# Altium footprint library FootPrintLib_9.PcbLib: 287 footprints (part 14 of 18)
Each footprint in its own frame and in the unit in brackets; x right, y up, seen from the top. Pads: shape width x height; smd on the part's side, far side on the other; paste and mask are expansions set on the pad; w line width, h text height; cw(c..) or ccw(c..) is an arc to the next point about the centre after c.
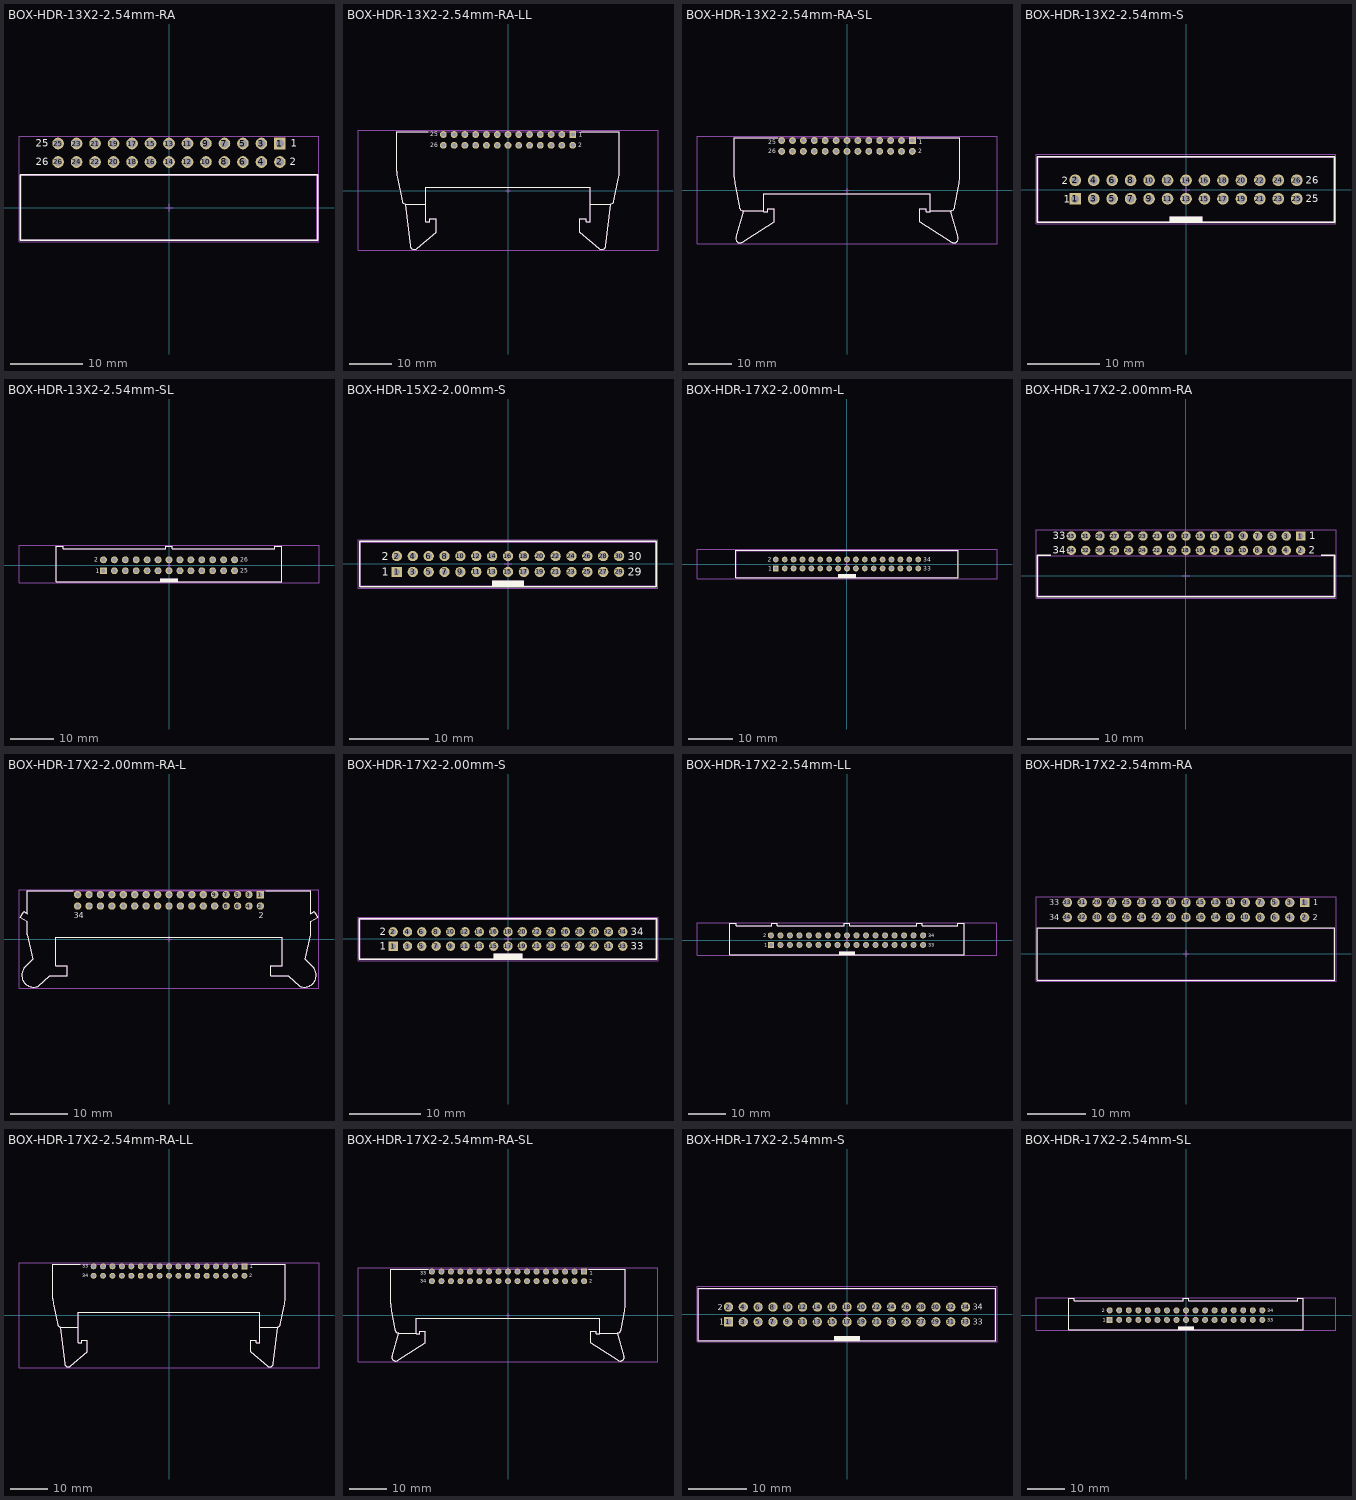
[diagram p13: the footprints below, top view; thin cyan lines are the x and y axes]

## BOX-HDR-13X2-2.54mm-RA [mm] "26 pins, right angled, gold plating"
height 9.1
pads (26):
  rect 1.6x1.6 hole 1.1: 1(15.24,8.805)
  round 1.6 hole 1.1: 2(15.24,6.265) 3(12.7,8.805) 4(12.7,6.265) 5(10.16,8.805) 6(10.16,6.265) 7(7.62,8.805) 8(7.62,6.265) 9(5.08,8.805) 10(5.08,6.265) 11(2.54,8.805) 12(2.54,6.265) 13(0,8.805) 14(0,6.265) 15(-2.54,8.805) 16(-2.54,6.265) 17(-5.08,8.805) 18(-5.08,6.265) 19(-7.62,8.805) 20(-7.62,6.265) 21(-10.16,8.805) 22(-10.16,6.265) 23(-12.7,8.805) 24(-12.7,6.265) 25(-15.24,8.805) 26(-15.24,6.265)
Top Overlay:
  lines w0.2: -20.415,-4.5 20.415,-4.5 20.415,4.5 -20.415,4.5 -20.415,-4.5
  text "25" at -18.31,8.34 h1.02
  text "26" at -18.31,5.8 h1.02
  text "1" at 16.7,8.34 h1.02
  text "2" at 16.6,5.8 h1.02
Mechanical 13:
  lines w0.1: -20.34,-4.425 20.34,-4.425 20.34,4.425 -20.34,4.425 -20.34,-4.425
Mechanical 15:
  lines w0.05: -0.5,0 0.5,0 ; 0,-0.5 0,0.5 ; -20.615,-4.7 -20.615,9.805 20.615,9.805 20.615,-4.7 -20.615,-4.7
3D body "61202621721.stp": height 9.23, standoff -2.88, extent -20.34,-4.425 20.34,9.125

## BOX-HDR-13X2-2.54mm-RA-LL [mm] "26 pins, right angeled, long lever, gold plating"
height 10.8
pads (26):
  rect 1.6x1.6 hole 1.02: 1(15.24,13.23)
  round 1.6 hole 1.02: 2(15.24,10.69) 3(12.7,13.23) 4(12.7,10.69) 5(10.16,13.23) 6(10.16,10.69) 7(7.62,13.23) 8(7.62,10.69) 9(5.08,13.23) 10(5.08,10.69) 11(2.54,13.23) 12(2.54,10.69) 13(0,13.23) 14(0,10.69) 15(-2.54,13.23) 16(-2.54,10.69) 17(-5.08,13.23) 18(-5.08,10.69) 19(-7.62,13.23) 20(-7.62,10.69) 21(-10.16,13.23) 22(-10.16,10.69) 23(-12.7,13.23) 24(-12.7,10.69) 25(-15.24,13.23) 26(-15.24,10.69)
Top Overlay:
  lines w0.2: -26.26,4.54 -26.26,13.85 -18.81,13.85 ; -26.255,4.54 ccw(c-16.26,4.84) -26.014,2.636 -24.969,-2.534 ; -24.963,-2.533 ccw(c-24.04,-2.15) -24.04,-3.15 -19.36,-3.15 ; -24.224,-3.15 -23.078,-13.022 ccw(c-22.09,-12.87) -21.432,-13.623 -16.961,-9.758 ; -16.96,-9.76 -16.96,-6.66 -18.46,-6.66 -18.46,-7.37 -19.36,-7.37 -19.36,0.85 19.36,0.85 19.36,-7.37 18.46,-7.37 18.46,-6.66 16.96,-6.66 16.96,-9.76 ; 16.961,-9.758 21.433,-13.623 ccw(c22.09,-12.87) 23.078,-13.022 24.224,-3.15 ; 17.21,13.85 26.26,13.85 26.26,4.54 ; 19.36,-3.15 24.04,-3.15 ccw(c24.04,-2.15) 24.964,-2.533 ; 24.969,-2.534 26.014,2.636 ccw(c16.26,4.84) 26.256,4.54
  text "2" at 16.56,10.26 h1.02
  text "1" at 16.66,12.66 h1.02
  text "26" at -18.31,10.26 h1.02
  text "25" at -18.31,12.8 h1.02
Mechanical 13:
  lines w0.1: -26.26,4.54 -26.26,13.85 26.26,13.85 26.26,4.54 ; -26.255,4.54 ccw(c-16.26,4.84) -26.014,2.636 -24.969,-2.534 ; -24.963,-2.533 ccw(c-24.04,-2.15) -24.04,-3.15 -19.36,-3.15 ; -24.224,-3.15 -23.078,-13.022 ccw(c-22.09,-12.87) -21.432,-13.623 -16.961,-9.758 ; -16.96,-9.76 -16.96,-6.66 -18.46,-6.66 -18.46,-7.37 -19.36,-7.37 -19.36,0.85 19.36,0.85 19.36,-7.37 18.46,-7.37 18.46,-6.66 16.96,-6.66 16.96,-9.76 ; 16.961,-9.758 21.433,-13.623 ccw(c22.09,-12.87) 23.078,-13.022 24.224,-3.15 ; 19.36,-3.15 24.04,-3.15 ccw(c24.04,-2.15) 24.964,-2.533 ; 24.969,-2.534 26.014,2.636 ccw(c16.26,4.84) 26.256,4.54
Mechanical 15:
  lines w0.05: -0.5,0 0.5,0 ; 0,-0.5 0,0.5 ; -35.36,-14.06 35.36,-14.06 35.36,14.23 -35.36,14.23 -35.36,-14.06
3D body "61202622921 (rev1).stp": height 8.35, standoff -2.35, extent -26.26,-13.871 26.26,13.85

## BOX-HDR-13X2-2.54mm-RA-SL [mm] "26 pins, right angeled, short lever, gold plating"
height 8.3
pads (26):
  rect 1.6x1.6 hole 1.02: 1(15.24,11.63)
  round 1.6 hole 1.02: 2(15.24,9.09) 3(12.7,11.63) 4(12.7,9.09) 5(10.16,11.63) 6(10.16,9.09) 7(7.62,11.63) 8(7.62,9.09) 9(5.08,11.63) 10(5.08,9.09) 11(2.54,11.63) 12(2.54,9.09) 13(0,11.63) 14(0,9.09) 15(-2.54,11.63) 16(-2.54,9.09) 17(-5.08,11.63) 18(-5.08,9.09) 19(-7.62,11.63) 20(-7.62,9.09) 21(-10.16,11.63) 22(-10.16,9.09) 23(-12.7,11.63) 24(-12.7,9.09) 25(-15.24,11.63) 26(-15.24,9.09)
Top Overlay:
  lines w0.2: -25.124,-3.751 -26.066,1.138 cw(c-16.26,3.1) -26.26,3.1 -26.26,12.25 -16.16,12.25 ; -25.12,-3.75 ccw(c-24.12,-3.75) -24.12,-4.75 ; -24.215,-4.75 -19.46,-4.75 ; -24.034,-4.851 -25.867,-10.941 ccw(c-24.91,-11.23) -24.36,-12.066 -16.96,-7.33 -16.96,-4.23 -18.46,-4.23 -18.46,-4.94 -19.46,-4.94 -19.46,-0.75 19.46,-0.75 19.46,-4.94 18.46,-4.94 18.46,-4.23 16.96,-4.23 16.96,-7.33 24.36,-12.067 ccw(c24.91,-11.23) 25.867,-10.941 24.034,-4.851 ; 16.41,12.25 26.26,12.25 26.26,3.1 cw(c16.26,3.1) 26.066,1.138 25.124,-3.751 ; 19.46,-4.75 24.215,-4.75 ; 24.12,-4.75 ccw(c24.12,-3.75) 25.12,-3.75
  text "2" at 16.66,8.6 h1.02
  text "1" at 16.76,10.8 h1.02
  text "25" at -18.31,10.8 h1.02
  text "26" at -18.31,8.6 h1.02
Mechanical 13:
  lines w0.1: -25.124,-3.751 -26.066,1.138 cw(c-16.26,3.1) -26.26,3.1 -26.26,12.25 26.26,12.25 26.26,3.1 cw(c16.26,3.1) 26.066,1.138 25.124,-3.751 ; -25.12,-3.75 ccw(c-24.12,-3.75) -24.12,-4.75 ; -24.215,-4.75 -19.46,-4.75 ; -24.034,-4.851 -25.867,-10.941 ccw(c-24.91,-11.23) -24.36,-12.066 -16.96,-7.33 -16.96,-4.23 -18.46,-4.23 -18.46,-4.94 -19.46,-4.94 -19.46,-0.75 19.46,-0.75 19.46,-4.94 18.46,-4.94 18.46,-4.23 16.96,-4.23 16.96,-7.33 24.36,-12.067 ccw(c24.91,-11.23) 25.867,-10.941 24.034,-4.851 ; 19.46,-4.75 24.215,-4.75 ; 24.12,-4.75 ccw(c24.12,-3.75) 25.12,-3.75
Mechanical 15:
  lines w0.05: -0.5,0 0.5,0 ; 0,-0.5 0,0.5 ; -34.96,-12.45 34.96,-12.45 34.96,12.63 -34.96,12.63 -34.96,-12.45
3D body "61202622121.stp": height 8.35, standoff -3.35, extent -26.26,-12.25 26.26,12.25

## BOX-HDR-13X2-2.54mm-S [mm] "26 pins, straight, gold plating"
height 9.1
pads (26):
  rect 1.6x1.6 hole 1.1: 1(-15.24,-1.27)
  round 1.6 hole 1.1: 2(-15.24,1.27) 3(-12.7,-1.27) 4(-12.7,1.27) 5(-10.16,-1.27) 6(-10.16,1.27) 7(-7.62,-1.27) 8(-7.62,1.27) 9(-5.08,-1.27) 10(-5.08,1.27) 11(-2.54,-1.27) 12(-2.54,1.27) 13(0,-1.27) 14(0,1.27) 15(2.54,-1.27) 16(2.54,1.27) 17(5.08,-1.27) 18(5.08,1.27) 19(7.62,-1.27) 20(7.62,1.27) 21(10.16,-1.27) 22(10.16,1.27) 23(12.7,-1.27) 24(12.7,1.27) 25(15.24,-1.27) 26(15.24,1.27)
Top Overlay:
  rectangle: -2.25,-4.5 2.25,-3.7
  lines w0.2: -20.44,-4.5 -20.44,4.5 20.44,4.5 20.44,-4.5 -20.44,-4.5
  text "26" at 16.5,0.8 h1.02
  text "25" at 16.5,-1.74 h1.02
  text "2" at -17.1,0.74 h1.02
  text "1" at -16.8,-1.8 h1.02
Mechanical 13:
  rectangle: -2.25,-4.425 2.25,-3.7
  lines w0.1: -20.34,-4.425 20.34,-4.425 20.34,4.425 -20.34,4.425 -20.34,-4.425
Mechanical 15:
  lines w0.05: -0.5,0 0.5,0 ; 0,-0.5 0,0.5 ; -20.64,-4.7 -20.64,4.85 20.64,4.85 20.64,-4.7 -20.64,-4.7
3D body "61202621621.stp": height 9.13, standoff -2.98, extent -20.34,-4.425 20.34,4.75

## BOX-HDR-13X2-2.54mm-SL [mm] "26 pins, straight, short lever, gold plating"
height 24.5
pads (26):
  rect 1.6x1.6 hole 1.02: 1(-15.24,-1.27)
  round 1.6 hole 1.02: 2(-15.24,1.27) 3(-12.7,-1.27) 4(-12.7,1.27) 5(-10.16,-1.27) 6(-10.16,1.27) 7(-7.62,-1.27) 8(-7.62,1.27) 9(-5.08,-1.27) 10(-5.08,1.27) 11(-2.54,-1.27) 12(-2.54,1.27) 13(0,-1.27) 14(0,1.27) 15(2.54,-1.27) 16(2.54,1.27) 17(5.08,-1.27) 18(5.08,1.27) 19(7.62,-1.27) 20(7.62,1.27) 21(10.16,-1.27) 22(10.16,1.27) 23(12.7,-1.27) 24(12.7,1.27) 25(15.24,-1.27) 26(15.24,1.27)
Top Overlay:
  rectangle: -2.1,-3.85 2.1,-3.05
  lines w0.2: -0.7,4.45 0.7,4.45 0.7,3.85 24.61,3.85 24.61,4.45 26.16,4.45 26.16,-3.85 -26.16,-3.85 -26.16,4.45 -24.61,4.45 -24.61,3.85 -0.7,3.85 -0.7,4.45 ; -0.7,4.45 -0.7,4.45
  text "2" at -17.36,0.8 h1.02
  text "1" at -17.06,-1.8 h1.02
  text "25" at 16.56,-1.74 h1.02
  text "26" at 16.56,0.8 h1.02
Mechanical 13:
  rectangle: -2.1,-3.85 2.1,-3.05
  lines w0.1: -0.7,4.45 -0.7,3.85 -24.61,3.85 -24.61,4.45 -26.16,4.45 -26.16,-3.85 26.16,-3.85 26.16,4.45 24.61,4.45 24.61,3.85 0.7,3.85 0.7,4.45 -0.7,4.45 ; -0.7,4.45 -0.7,4.45
Mechanical 15:
  lines w0.05: -0.5,0 0.5,0 ; 0,-0.5 0,0.5 ; -34.86,-4.05 -34.86,4.65 34.86,4.65 34.86,-4.05 -34.86,-4.05
3D body "61202622021.stp": height 24.55, standoff -3.35, extent -26.259,-3.849 26.261,4.451

## BOX-HDR-15X2-2.00mm-S [mm] "2.00mm Male Box Header, 30p"
height 5.6
pads (30):
  rect 1.3x1.3 hole 0.8: 1(-14,-1)
  round 1.3 hole 0.8: 2(-14,1) 3(-12,-1) 4(-12,1) 5(-10,-1) 6(-10,1) 7(-8,-1) 8(-8,1) 9(-6,-1) 10(-6,1) 11(-4,-1) 12(-4,1) 13(-2,-1) 14(-2,1) 15(0,-1) 16(0,1) 17(2,-1) 18(2,1) 19(4,-1) 20(4,1) 21(6,-1) 22(6,1) 23(8,-1) 24(8,1) 25(10,-1) 26(10,1) 27(12,-1) 28(12,1) 29(14,-1) 30(14,1)
Top Overlay:
  rectangle: -2,-2.85 2,-2.05
  lines w0.2: -18.7,-2.85 18.7,-2.85 18.7,2.85 -18.7,2.85 -18.7,-2.85
  text "1" at -15.9,-1.5 h1.02
  text "2" at -15.9,0.5 h1.02
  text "30" at 15.1,0.5 h1.02
  text "29" at 15.1,-1.5 h1.02
Mechanical 13:
  rectangle: -2,-2.75 2,-2.05
  lines w0.1: -18.6,-2.75 -18.6,2.75 18.6,2.75 18.6,-2.75 -18.6,-2.75
Mechanical 15:
  lines w0.05: -0.5,0 0.5,0 ; 0,-0.5 0,0.5 ; -18.9,-3.05 -18.9,3.05 18.9,3.05 18.9,-3.05 -18.9,-3.05
3D body "62503021621.stp": height 5.65, standoff -2.5, extent -18.6,-2.75 18.6,2.75

## BOX-HDR-17X2-2.00mm-L [mm] "2.00mm Male Box Header with Lever, 34p"
height 16.85
pads (34):
  rect 1.3x1.3 hole 0.8: 1(-16,-1)
  round 1.3 hole 0.8: 2(-16,1) 3(-14,-1) 4(-14,1) 5(-12,-1) 6(-12,1) 7(-10,-1) 8(-10,1) 9(-8,-1) 10(-8,1) 11(-6,-1) 12(-6,1) 13(-4,-1) 14(-4,1) 15(-2,-1) 16(-2,1) 17(0,-1) 18(0,1) 19(2,-1) 20(2,1) 21(4,-1) 22(4,1) 23(6,-1) 24(6,1) 25(8,-1) 26(8,1) 27(10,-1) 28(10,1) 29(12,-1) 30(12,1) 31(14,-1) 32(14,1) 33(16,-1) 34(16,1)
Top Overlay:
  rectangle: -2,-3.1 2,-2.3
  lines w0.2: -25,-3.1 25,-3.1 25,3.1 -25,3.1 -25,-3.1
  text "34" at 17.1,0.5 h1.02
  text "33" at 17.1,-1.5 h1.02
  text "2" at -17.8,0.5 h1.02
  text "1" at -17.7,-1.5 h1.02
Mechanical 13:
  rectangle: -2,-3 2,-2.3
  lines w0.1: -24.85,-3 24.85,-3 24.85,3 -24.85,3 -24.85,-3
Mechanical 15:
  lines w0.05: -0.5,0 0.5,0 ; 0,-0.5 0,0.5 ; -33.7,-3.3 -33.7,3.3 33.7,3.3 33.7,-3.3 -33.7,-3.3
3D body "62503422021.stp": height 16.9, standoff -2.95, extent -26.062,-3 26.063,3

## BOX-HDR-17X2-2.00mm-RA [mm] "2.00mm Male Angled Box Header, 34p"
height 5.4
pads (34):
  rect 1.3x1.3 hole 0.8: 1(16,5.55)
  round 1.3 hole 0.8: 2(16,3.55) 3(14,5.55) 4(14,3.55) 5(12,5.55) 6(12,3.55) 7(10,5.55) 8(10,3.55) 9(8,5.55) 10(8,3.55) 11(6,5.55) 12(6,3.55) 13(4,5.55) 14(4,3.55) 15(2,5.55) 16(2,3.55) 17(0,5.55) 18(0,3.55) 19(-2,5.55) 20(-2,3.55) 21(-4,5.55) 22(-4,3.55) 23(-6,5.55) 24(-6,3.55) 25(-8,5.55) 26(-8,3.55) 27(-10,5.55) 28(-10,3.55) 29(-12,5.55) 30(-12,3.55) 31(-14,5.55) 32(-14,3.55) 33(-16,5.55) 34(-16,3.55)
Top Overlay:
  lines w0.2: -18.875,2.9 -20.725,2.9 -20.725,-2.9 20.725,-2.9 20.725,2.9 18.875,2.9
  text "2" at 17.1,3.075 h1.02
  text "1" at 17.2,5.075 h1.02
  text "33" at -18.6,5.075 h1.02
  text "34" at -18.6,3.075 h1.02
Mechanical 13:
  lines w0.1: -20.6,-2.8 20.6,-2.8 20.6,2.8 -20.6,2.8 -20.6,-2.8
Mechanical 15:
  lines w0.05: -0.5,0 0.5,0 ; 0,-0.5 0,0.5 ; -20.925,-3.1 20.925,-3.1 20.925,6.4 -20.925,6.4 -20.925,-3.1
3D body "62503421721 (rev1).stp": height 5.5, standoff -2.85, extent -20.6,-2.8 20.6,5.8

## BOX-HDR-17X2-2.00mm-RA-L [mm] "2.00mm Male Angled Box Header with Lever, 34p"
height 3.15
pads (34):
  rect 1.3x1.3 hole 0.8: 1(16,7.775)
  round 1.3 hole 0.8: 2(16,5.775) 3(14,7.775) 4(14,5.775) 5(12,7.775) 6(12,5.775) 7(10,7.775) 8(10,5.775) 9(8,7.775) 10(8,5.775) 11(6,7.775) 12(6,5.775) 13(4,7.775) 14(4,5.775) 15(2,7.775) 16(2,5.775) 17(0,7.775) 18(0,5.775) 19(-2,7.775) 20(-2,5.775) 21(-4,7.775) 22(-4,5.775) 23(-6,7.775) 24(-6,5.775) 25(-8,7.775) 26(-8,5.775) 27(-10,7.775) 28(-10,5.775) 29(-12,7.775) 30(-12,5.775) 31(-14,7.775) 32(-14,5.775) 33(-16,7.775) 34(-16,5.775)
Top Overlay:
  lines w0.2: -25.466,4.813 -26.06,3.785 -24.851,3.087 -24.851,0.753 ; -25.46,4.815 -24.848,4.462 ; -24.894,-4.611 ccw(c-23.68,-6.325) -22.865,-8.26 ; -24.892,-4.613 -23.85,-3.535 -24.837,0.738 ; -24.85,4.464 -24.85,8.425 -16.75,8.425 ; -22.866,-8.259 -20.85,-6.475 -17.85,-6.475 -17.85,-4.675 -19.85,-4.675 -19.85,0.325 19.85,0.325 19.85,-4.675 17.85,-4.675 17.85,-6.475 20.85,-6.475 22.866,-8.259 ; 16.95,8.425 24.85,8.425 24.85,4.464 ; 22.865,-8.26 ccw(c23.68,-6.325) 24.894,-4.611 ; 24.837,0.738 23.85,-3.535 24.892,-4.613 ; 24.848,4.462 25.46,4.815 ; 24.851,0.753 24.851,3.087 26.06,3.785 25.466,4.813
  text "34" at -16.7,3.675 h1.02
  text "2" at 15.7,3.675 h1.02
Mechanical 13:
  lines w0.1: -25.466,4.813 -26.06,3.785 -24.851,3.087 -24.851,0.753 ; -25.46,4.815 -24.848,4.462 ; -24.894,-4.611 ccw(c-23.68,-6.325) -22.865,-8.26 ; -24.892,-4.613 -23.85,-3.535 -24.837,0.738 ; -24.85,4.464 -24.85,8.425 24.85,8.425 ; -22.866,-8.259 -20.85,-6.475 -17.85,-6.475 -17.85,-4.675 -19.85,-4.675 -19.85,0.325 19.85,0.325 19.85,-4.675 17.85,-4.675 17.85,-6.475 20.85,-6.475 22.866,-8.259 ; 22.865,-8.26 ccw(c23.68,-6.325) 24.894,-4.611 ; 24.837,0.738 23.85,-3.535 24.892,-4.613 ; 24.848,4.462 25.46,4.815 ; 24.848,8.423 24.85,8.425 ; 24.85,4.464 24.85,8.425 ; 24.851,0.753 24.851,3.087 26.06,3.785 25.466,4.813
Mechanical 15:
  lines w0.05: -0.5,0 0.5,0 ; 0,-0.5 0,0.5 ; -26.262,-8.625 -26.262,8.625 26.262,8.625 26.262,-8.625 -26.262,-8.625
3D body "62503422121.stp": height 6.1, standoff -3.05, extent -26.062,-8.425 26.062,8.425

## BOX-HDR-17X2-2.00mm-S [mm] "2.00mm Male Box Header, 34p"
height 5.6
pads (34):
  rect 1.3x1.3 hole 0.8: 1(-16,-1)
  round 1.3 hole 0.8: 2(-16,1) 3(-14,-1) 4(-14,1) 5(-12,-1) 6(-12,1) 7(-10,-1) 8(-10,1) 9(-8,-1) 10(-8,1) 11(-6,-1) 12(-6,1) 13(-4,-1) 14(-4,1) 15(-2,-1) 16(-2,1) 17(0,-1) 18(0,1) 19(2,-1) 20(2,1) 21(4,-1) 22(4,1) 23(6,-1) 24(6,1) 25(8,-1) 26(8,1) 27(10,-1) 28(10,1) 29(12,-1) 30(12,1) 31(14,-1) 32(14,1) 33(16,-1) 34(16,1)
Top Overlay:
  rectangle: -2,-2.85 2,-2.05
  lines w0.2: -20.7,-2.85 20.7,-2.85 20.7,2.85 -20.7,2.85 -20.7,-2.85
  text "1" at -17.9,-1.5 h1.02
  text "2" at -17.9,0.5 h1.02
  text "33" at 17.1,-1.5 h1.02
  text "34" at 17.1,0.5 h1.02
Mechanical 13:
  rectangle: -2,-2.75 2,-2.05
  lines w0.1: -20.6,-2.75 -20.6,2.75 20.6,2.75 20.6,-2.75 -20.6,-2.75
Mechanical 15:
  lines w0.05: -0.5,0 0.5,0 ; 0,-0.5 0,0.5 ; -20.9,-3.05 -20.9,3.05 20.9,3.05 20.9,-3.05 -20.9,-3.05
3D body "62503421621.stp": height 5.65, standoff -2.5, extent -20.6,-2.75 20.6,2.75

## BOX-HDR-17X2-2.54mm-LL [mm] "34 pins, straight, long lever, gold plating"
height 28
pads (34):
  rect 1.6x1.6 hole 1.02: 1(-20.32,-1.27)
  round 1.6 hole 1.02: 2(-20.32,1.27) 3(-17.78,-1.27) 4(-17.78,1.27) 5(-15.24,-1.27) 6(-15.24,1.27) 7(-12.7,-1.27) 8(-12.7,1.27) 9(-10.16,-1.27) 10(-10.16,1.27) 11(-7.62,-1.27) 12(-7.62,1.27) 13(-5.08,-1.27) 14(-5.08,1.27) 15(-2.54,-1.27) 16(-2.54,1.27) 17(0,-1.27) 18(0,1.27) 19(2.54,-1.27) 20(2.54,1.27) 21(5.08,-1.27) 22(5.08,1.27) 23(7.62,-1.27) 24(7.62,1.27) 25(10.16,-1.27) 26(10.16,1.27) 27(12.7,-1.27) 28(12.7,1.27) 29(15.24,-1.27) 30(15.24,1.27) 31(17.78,-1.27) 32(17.78,1.27) 33(20.32,-1.27) 34(20.32,1.27)
Top Overlay:
  rectangle: -2.1,-3.85 2.1,-3.04
  lines w0.2: -31.34,-3.85 31.34,-3.85 31.34,4.45 29.61,4.45 29.61,3.85 20.04,3.85 20.04,4.45 18.64,4.45 18.64,3.85 0.7,3.85 0.7,4.45 -0.7,4.45 -0.7,3.85 -18.64,3.85 -18.64,4.45 -20.04,4.45 -20.04,3.85 -29.61,3.85 -29.61,4.45 -31.34,4.45 -31.34,-3.85
  text "1" at -22.14,-1.8 h1.02
  text "2" at -22.34,0.8 h1.02
  text "34" at 21.74,0.8 h1.02
  text "33" at 21.74,-1.74 h1.02
Mechanical 13:
  rectangle: -2.1,-3.85 2.1,-3.04
  lines w0.1: -31.34,-3.85 -31.34,4.45 -29.61,4.45 -29.61,3.85 -20.04,3.85 -20.04,4.45 -18.64,4.45 -18.64,3.85 -0.7,3.85 -0.7,4.45 0.7,4.45 0.7,3.85 18.64,3.85 18.64,4.45 20.04,4.45 20.04,3.85 29.61,3.85 29.61,4.45 31.34,4.45 31.34,-3.85 -31.34,-3.85
Mechanical 15:
  lines w0.05: -0.5,0 0.5,0 ; 0,-0.5 0,0.5 ; -40.04,-4.05 40.04,-4.05 40.04,4.65 -40.04,4.65 -40.04,-4.05
3D body "61203422821 (rev1).stp": height 27.84, standoff -3.35, extent -31.34,-3.86 31.34,4.45

## BOX-HDR-17X2-2.54mm-RA [mm] "34 pins, right angled, gold plating"
height 9.1
pads (34):
  rect 1.6x1.6 hole 1.1: 1(20.32,8.805)
  round 1.6 hole 1.1: 2(20.32,6.265) 3(17.78,8.805) 4(17.78,6.265) 5(15.24,8.805) 6(15.24,6.265) 7(12.7,8.805) 8(12.7,6.265) 9(10.16,8.805) 10(10.16,6.265) 11(7.62,8.805) 12(7.62,6.265) 13(5.08,8.805) 14(5.08,6.265) 15(2.54,8.805) 16(2.54,6.265) 17(0,8.805) 18(0,6.265) 19(-2.54,8.805) 20(-2.54,6.265) 21(-5.08,8.805) 22(-5.08,6.265) 23(-7.62,8.805) 24(-7.62,6.265) 25(-10.16,8.805) 26(-10.16,6.265) 27(-12.7,8.805) 28(-12.7,6.265) 29(-15.24,8.805) 30(-15.24,6.265) 31(-17.78,8.805) 32(-17.78,6.265) 33(-20.32,8.805) 34(-20.32,6.265)
Top Overlay:
  lines w0.2: -25.495,-4.5 -25.495,4.5 25.495,4.5 25.495,-4.5 -25.495,-4.5
  text "2" at 21.68,5.8 h1.02
  text "1" at 21.78,8.34 h1.02
  text "33" at -23.39,8.34 h1.02
  text "34" at -23.39,5.8 h1.02
Mechanical 13:
  lines w0.1: -25.42,-4.425 -25.42,4.425 25.42,4.425 25.42,-4.425 -25.42,-4.425
Mechanical 15:
  lines w0.05: -0.5,0 0.5,0 ; 0,-0.5 0,0.5 ; -25.695,-4.7 25.695,-4.7 25.695,9.805 -25.695,9.805 -25.695,-4.7
3D body "61203421721.stp": height 9.23, standoff -2.88, extent -25.42,-4.425 25.42,9.125

## BOX-HDR-17X2-2.54mm-RA-LL [mm] "34 pins, right angeled, long lever, gold plating"
height 10.8
pads (34):
  rect 1.6x1.6 hole 1.02: 1(20.32,13.23)
  round 1.6 hole 1.02: 2(20.32,10.69) 3(17.78,13.23) 4(17.78,10.69) 5(15.24,13.23) 6(15.24,10.69) 7(12.7,13.23) 8(12.7,10.69) 9(10.16,13.23) 10(10.16,10.69) 11(7.62,13.23) 12(7.62,10.69) 13(5.08,13.23) 14(5.08,10.69) 15(2.54,13.23) 16(2.54,10.69) 17(0,13.23) 18(0,10.69) 19(-2.54,13.23) 20(-2.54,10.69) 21(-5.08,13.23) 22(-5.08,10.69) 23(-7.62,13.23) 24(-7.62,10.69) 25(-10.16,13.23) 26(-10.16,10.69) 27(-12.7,13.23) 28(-12.7,10.69) 29(-15.24,13.23) 30(-15.24,10.69) 31(-17.78,13.23) 32(-17.78,10.69) 33(-20.32,13.23) 34(-20.32,10.69)
Top Overlay:
  lines w0.2: -31.34,4.54 -31.34,13.85 -23.89,13.85 ; -31.335,4.54 ccw(c-21.34,4.84) -31.094,2.636 -30.049,-2.534 ; -30.043,-2.533 ccw(c-29.12,-2.15) -29.12,-3.15 -24.44,-3.15 ; -29.304,-3.15 -28.158,-13.022 ccw(c-27.17,-12.87) -26.512,-13.623 -22.041,-9.758 ; -22.04,-9.76 -22.04,-6.66 -23.54,-6.66 -23.54,-7.37 -24.44,-7.37 -24.44,0.85 24.44,0.85 24.44,-7.37 23.54,-7.37 23.54,-6.66 22.04,-6.66 22.04,-9.76 ; 22.041,-9.758 26.513,-13.623 ccw(c27.17,-12.87) 28.158,-13.022 29.304,-3.15 ; 22.29,13.85 31.34,13.85 31.34,4.54 ; 24.44,-3.15 29.12,-3.15 ccw(c29.12,-2.15) 30.044,-2.533 ; 30.049,-2.534 31.094,2.636 ccw(c21.34,4.84) 31.336,4.54
  text "2" at 21.64,10.26 h1.02
  text "1" at 21.74,12.66 h1.02
  text "33" at -23.39,12.8 h1.02
  text "34" at -23.39,10.26 h1.02
Mechanical 13:
  lines w0.1: -31.34,4.54 -31.34,13.85 31.34,13.85 31.34,4.54 ; -31.335,4.54 ccw(c-21.34,4.84) -31.094,2.636 -30.049,-2.534 ; -30.043,-2.533 ccw(c-29.12,-2.15) -29.12,-3.15 -24.44,-3.15 ; -29.304,-3.15 -28.158,-13.022 ccw(c-27.17,-12.87) -26.512,-13.623 -22.041,-9.758 ; -22.04,-9.76 -22.04,-6.66 -23.54,-6.66 -23.54,-7.37 -24.44,-7.37 -24.44,0.85 24.44,0.85 24.44,-7.37 23.54,-7.37 23.54,-6.66 22.04,-6.66 22.04,-9.76 ; 22.041,-9.758 26.513,-13.623 ccw(c27.17,-12.87) 28.158,-13.022 29.304,-3.15 ; 24.44,-3.15 29.12,-3.15 ccw(c29.12,-2.15) 30.044,-2.533 ; 30.049,-2.534 31.094,2.636 ccw(c21.34,4.84) 31.336,4.54
Mechanical 15:
  lines w0.05: -0.5,0 0.5,0 ; 0,-0.5 0,0.5 ; -40.44,-14.06 40.44,-14.06 40.44,14.23 -40.44,14.23 -40.44,-14.06
3D body "61203422921 (rev1).stp": height 8.35, standoff -2.35, extent -31.34,-13.871 31.34,13.85

## BOX-HDR-17X2-2.54mm-RA-SL [mm] "34 pins, right angeled, short lever, gold plating"
height 8.3
pads (34):
  rect 1.6x1.6 hole 1.02: 1(20.32,11.63)
  round 1.6 hole 1.02: 2(20.32,9.09) 3(17.78,11.63) 4(17.78,9.09) 5(15.24,11.63) 6(15.24,9.09) 7(12.7,11.63) 8(12.7,9.09) 9(10.16,11.63) 10(10.16,9.09) 11(7.62,11.63) 12(7.62,9.09) 13(5.08,11.63) 14(5.08,9.09) 15(2.54,11.63) 16(2.54,9.09) 17(0,11.63) 18(0,9.09) 19(-2.54,11.63) 20(-2.54,9.09) 21(-5.08,11.63) 22(-5.08,9.09) 23(-7.62,11.63) 24(-7.62,9.09) 25(-10.16,11.63) 26(-10.16,9.09) 27(-12.7,11.63) 28(-12.7,9.09) 29(-15.24,11.63) 30(-15.24,9.09) 31(-17.78,11.63) 32(-17.78,9.09) 33(-20.32,11.63) 34(-20.32,9.09)
Top Overlay:
  lines w0.2: -30.204,-3.751 -31.146,1.138 cw(c-21.34,3.1) -31.34,3.1 -31.34,12.25 -21.24,12.25 ; -30.2,-3.75 ccw(c-29.2,-3.75) -29.2,-4.75 ; -29.295,-4.75 -24.54,-4.75 ; -29.114,-4.851 -30.947,-10.941 ccw(c-29.99,-11.23) -29.44,-12.066 -22.04,-7.33 -22.04,-4.23 -23.54,-4.23 -23.54,-4.94 -24.54,-4.94 -24.54,-0.75 24.54,-0.75 24.54,-4.94 23.54,-4.94 23.54,-4.23 22.04,-4.23 22.04,-7.33 29.44,-12.067 ccw(c29.99,-11.23) 30.947,-10.941 29.114,-4.851 ; 21.49,12.25 31.34,12.25 31.34,3.1 cw(c21.34,3.1) 31.146,1.138 30.204,-3.751 ; 24.54,-4.75 29.295,-4.75 ; 29.2,-4.75 ccw(c29.2,-3.75) 30.2,-3.75
  text "1" at 21.84,10.8 h1.02
  text "2" at 21.74,8.6 h1.02
  text "33" at -23.39,10.8 h1.02
  text "34" at -23.39,8.6 h1.02
Mechanical 13:
  lines w0.1: -30.204,-3.751 -31.146,1.138 cw(c-21.34,3.1) -31.34,3.1 -31.34,12.25 31.34,12.25 31.34,3.1 cw(c21.34,3.1) 31.146,1.138 30.204,-3.751 ; -30.2,-3.75 ccw(c-29.2,-3.75) -29.2,-4.75 ; -29.295,-4.75 -24.54,-4.75 ; -29.114,-4.851 -30.947,-10.941 ccw(c-29.99,-11.23) -29.44,-12.066 -22.04,-7.33 -22.04,-4.23 -23.54,-4.23 -23.54,-4.94 -24.54,-4.94 -24.54,-0.75 24.54,-0.75 24.54,-4.94 23.54,-4.94 23.54,-4.23 22.04,-4.23 22.04,-7.33 29.44,-12.067 ccw(c29.99,-11.23) 30.947,-10.941 29.114,-4.851 ; 24.54,-4.75 29.295,-4.75 ; 29.2,-4.75 ccw(c29.2,-3.75) 30.2,-3.75
Mechanical 15:
  lines w0.05: -0.5,0 0.5,0 ; 0,-0.5 0,0.5 ; -40.04,-12.45 -40.04,12.63 40.04,12.63 40.04,-12.45 -40.04,-12.45
3D body "61203422121.stp": height 8.35, standoff -3.35, extent -31.34,-12.25 31.34,12.25

## BOX-HDR-17X2-2.54mm-S [mm] "34 pins, straight, gold plating"
height 9.1
pads (34):
  rect 1.6x1.6 hole 1.1: 1(-20.32,-1.27)
  round 1.6 hole 1.1: 2(-20.32,1.27) 3(-17.78,-1.27) 4(-17.78,1.27) 5(-15.24,-1.27) 6(-15.24,1.27) 7(-12.7,-1.27) 8(-12.7,1.27) 9(-10.16,-1.27) 10(-10.16,1.27) 11(-7.62,-1.27) 12(-7.62,1.27) 13(-5.08,-1.27) 14(-5.08,1.27) 15(-2.54,-1.27) 16(-2.54,1.27) 17(0,-1.27) 18(0,1.27) 19(2.54,-1.27) 20(2.54,1.27) 21(5.08,-1.27) 22(5.08,1.27) 23(7.62,-1.27) 24(7.62,1.27) 25(10.16,-1.27) 26(10.16,1.27) 27(12.7,-1.27) 28(12.7,1.27) 29(15.24,-1.27) 30(15.24,1.27) 31(17.78,-1.27) 32(17.78,1.27) 33(20.32,-1.27) 34(20.32,1.27)
Top Overlay:
  rectangle: -2.25,-4.5 2.25,-3.7
  lines w0.2: -25.52,-4.5 25.52,-4.5 25.52,4.5 -25.52,4.5 -25.52,-4.5
  text "1" at -21.88,-1.8 h1.02
  text "2" at -22.18,0.74 h1.02
  text "34" at 21.58,0.8 h1.02
  text "33" at 21.58,-1.74 h1.02
Mechanical 13:
  rectangle: -2.25,-4.425 2.25,-3.7
  lines w0.1: -25.42,-4.425 -25.42,4.425 25.42,4.425 25.42,-4.425 -25.42,-4.425
Mechanical 15:
  lines w0.05: -0.5,0 0.5,0 ; 0,-0.5 0,0.5 ; -25.72,-4.7 25.72,-4.7 25.72,4.85 -25.72,4.85 -25.72,-4.7
3D body "61203421621.stp": height 9.13, standoff -2.98, extent -25.42,-4.425 25.42,4.75

## BOX-HDR-17X2-2.54mm-SL [mm] "34 pins, straight, short lever, gold plating"
height 24.5
pads (34):
  rect 1.6x1.6 hole 1.02: 1(-20.32,-1.27)
  round 1.6 hole 1.02: 2(-20.32,1.27) 3(-17.78,-1.27) 4(-17.78,1.27) 5(-15.24,-1.27) 6(-15.24,1.27) 7(-12.7,-1.27) 8(-12.7,1.27) 9(-10.16,-1.27) 10(-10.16,1.27) 11(-7.62,-1.27) 12(-7.62,1.27) 13(-5.08,-1.27) 14(-5.08,1.27) 15(-2.54,-1.27) 16(-2.54,1.27) 17(0,-1.27) 18(0,1.27) 19(2.54,-1.27) 20(2.54,1.27) 21(5.08,-1.27) 22(5.08,1.27) 23(7.62,-1.27) 24(7.62,1.27) 25(10.16,-1.27) 26(10.16,1.27) 27(12.7,-1.27) 28(12.7,1.27) 29(15.24,-1.27) 30(15.24,1.27) 31(17.78,-1.27) 32(17.78,1.27) 33(20.32,-1.27) 34(20.32,1.27)
Top Overlay:
  rectangle: -2.1,-3.85 2.1,-3.05
  lines w0.2: -0.7,4.45 -0.7,3.85 -29.69,3.85 -29.69,4.45 -31.24,4.45 -31.24,-3.85 31.24,-3.85 31.24,4.45 29.69,4.45 29.69,3.85 0.7,3.85 0.7,4.45 -0.7,4.45 ; -0.7,4.45 -0.7,4.45
  text "1" at -22.14,-1.8 h1.02
  text "2" at -22.44,0.8 h1.02
  text "33" at 21.64,-1.74 h1.02
  text "34" at 21.64,0.8 h1.02
Mechanical 13:
  rectangle: -2.1,-3.85 2.1,-3.05
  lines w0.1: -0.7,4.45 0.7,4.45 0.7,3.85 29.69,3.85 29.69,4.45 31.24,4.45 31.24,-3.85 -31.24,-3.85 -31.24,4.45 -29.69,4.45 -29.69,3.85 -0.7,3.85 -0.7,4.45 ; -0.7,4.45 -0.7,4.45
Mechanical 15:
  lines w0.05: -0.5,0 0.5,0 ; 0,-0.5 0,0.5 ; -39.94,-4.05 39.94,-4.05 39.94,4.65 -39.94,4.65 -39.94,-4.05
3D body "61203422021.stp": height 24.55, standoff -3.35, extent -31.34,-3.85 31.34,4.45